# Altium schematic symbol library ADC124S101CIMM_NOPB.SchLib: 1 symbol
Pins are listed as number, name and electrical type; pins without a type are passive.

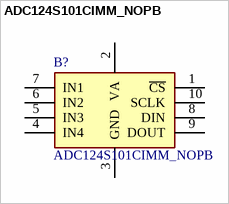
[diagram p0: symbol ADC124S101CIMM_NOPB]

## ADC124S101CIMM_NOPB
designator B?
4 Channel, 500 ksps to 1 Msps, 12-Bit A/D Converter; Manufacturer_Name: Texas Instruments; Manufacturer_Part_Number: ADC124S101CIMM/NOPB; Geometry.Height: 1.1mm; Mouser Part Number: 926-AD124S101CIMMNPB; Mouser Price/Stock: https://www.mouser.co.uk/ProductDetail/Texas-Instruments/ADC124S101CIMM-NOPB?qs=7X5t%252BdzoRHD7V7sCz8DzxQ%3D%3D; Datasheet Link: http://www.ti.com/lit/ds/symlink/adc124s101.pdf
footprint SOP50P490X110-10N
pins: 1 ~{CS}, 2 VA, 3 GND, 4 IN4, 5 IN3, 6 IN2, 7 IN1, 8 DIN, 9 DOUT, 10 SCLK